# Altium footprint library Batterie_footprint.PcbLib: 67 footprints (part 5 of 5)
Each footprint in its own frame and in the unit in brackets; x right, y up, seen from the top. Pads: shape width x height; smd on the part's side, far side on the other; paste and mask are expansions set on the pad; w line width, h text height; cw(c..) or ccw(c..) is an arc to the next point about the centre after c.
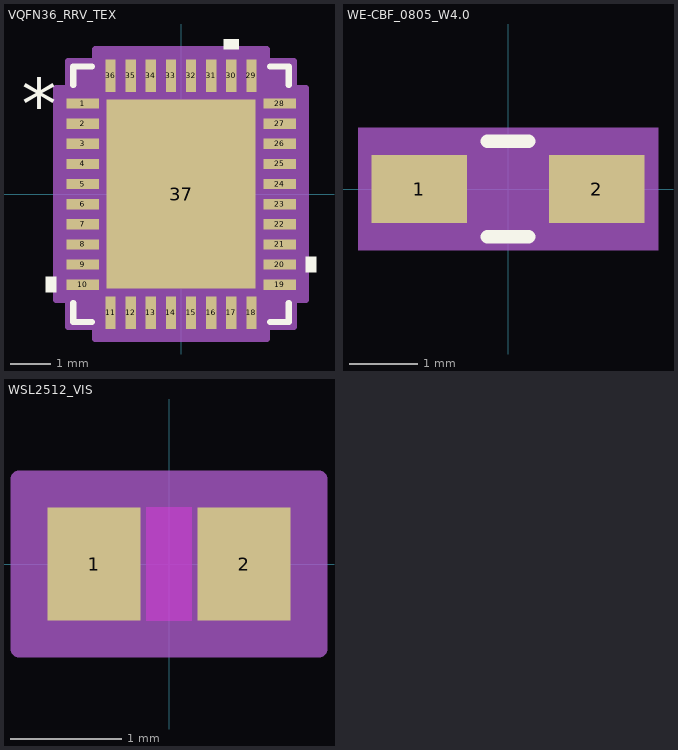
[diagram p4: the footprints below, top view; thin cyan lines are the x and y axes]

## VQFN36_RRV_TEX [mil]
pads (37):
  rect 31.81x10.03 smd paste+0 mask+0: 1(-96.41,88.61) 2(-96.41,68.92) 3(-96.41,49.23) 4(-96.41,29.54) 5(-96.41,9.85) 6(-96.41,-9.85) 7(-96.41,-29.54) 8(-96.41,-49.23) 9(-96.41,-68.92) 10(-96.41,-88.61) 19(96.41,-88.61) 20(96.41,-68.92) 21(96.41,-49.23) 22(96.41,-29.54) 23(96.41,-9.85) 24(96.41,9.85) 25(96.41,29.54) 26(96.41,49.23) 27(96.41,68.92) 28(96.41,88.61)
  rect 10.03x31.81 smd paste+0 mask+0: 11(-68.92,-115.91) 12(-49.23,-115.91) 13(-29.54,-115.91) 14(-9.85,-115.91) 15(9.85,-115.91) 16(29.54,-115.91) 17(49.23,-115.91) 18(68.92,-115.91) 29(68.92,115.91) 30(49.23,115.91) 31(29.54,115.91) 32(9.85,115.91) 33(-9.85,115.91) 34(-29.54,115.91) 35(-49.23,115.91) 36(-68.92,115.91)
  rect 146x185 smd paste+0 mask+0: 37(0,0)
Top Overlay:
  region: -122.31,-81.11 -132.31,-81.11 -132.31,-96.11 -122.31,-96.11
  region: 122.31,-61.41 132.31,-61.41 132.31,-76.42 122.31,-76.42
  region: 56.73,141.81 41.73,141.81 41.73,151.81 56.73,151.81
  lines w6: -105.5,-106.72 -105.5,-125 -87.03,-125 ; -105.5,106.72 -105.5,125 -87.03,125 ; 87.03,-125 105.5,-125 105.5,-106.72 ; 87.03,125 105.5,125 105.5,106.72
  text "*" at -155.81,63.6 h50
  text ".Designator" at -137.5,-25 h50
Mechanical 13:
  lines w1: -100.5,70 -50.5,120 ; -100.5,-120 100.5,-120 100.5,120 -100.5,120 -100.5,-120 ; -100.5,-94.61 -100.5,-82.61 -100.5,-94.61 ; -100.5,-74.92 -100.5,-62.91 -100.5,-74.92 ; -100.5,-55.23 -100.5,-43.23 -100.5,-55.23 ; -100.5,-35.53 -100.5,-23.54 -100.5,-35.53 ; -100.5,-15.85 -100.5,-3.85 -100.5,-15.85 ; -100.5,3.85 -100.5,15.85 -100.5,3.85 ; -100.5,23.54 -100.5,35.53 -100.5,23.54 ; -100.5,43.23 -100.5,55.23 -100.5,43.23 ; -100.5,62.91 -100.5,74.92 -100.5,62.91 ; -100.5,82.61 -100.5,94.61 -100.5,82.61 ; -74.92,-120 -62.91,-120 -74.92,-120 ; -74.92,120 -62.91,120 -74.92,120 ; -55.23,-120 -43.23,-120 -55.23,-120 ; -55.23,120 -43.23,120 -55.23,120 ; -35.53,-120 -23.54,-120 -35.53,-120 ; -35.53,120 -23.54,120 -35.53,120 ; -15.85,-120 -3.85,-120 -15.85,-120 ; -15.85,120 -3.85,120 -15.85,120 ; 3.85,-120 15.85,-120 3.85,-120 ; 3.85,120 15.85,120 3.85,120 ; 23.54,-120 35.53,-120 23.54,-120 ; 23.54,120 35.53,120 23.54,120 ; 43.23,-120 55.23,-120 43.23,-120 ; 43.23,120 55.23,120 43.23,120 ; 62.91,-120 74.92,-120 62.91,-120 ; 62.91,120 74.92,120 62.91,120 ; 100.5,-94.61 100.5,-82.61 100.5,-94.61 ; 100.5,-74.92 100.5,-62.91 100.5,-74.92 ; 100.5,-55.23 100.5,-43.23 100.5,-55.23 ; 100.5,-35.53 100.5,-23.54 100.5,-35.53 ; 100.5,-15.85 100.5,-3.85 100.5,-15.85 ; 100.5,3.85 100.5,15.85 100.5,3.85 ; 100.5,23.54 100.5,35.53 100.5,23.54 ; 100.5,43.23 100.5,55.23 100.5,43.23 ; 100.5,62.91 100.5,74.92 100.5,62.91 ; 100.5,82.61 100.5,94.61 100.5,82.61
  text ".Designator" at -137.5,-25 h50
  text "*" at -62,63.6 h50
Mechanical 15:
  region: -83.93,-130 -110.5,-130 -110.5,-103.62 -122.31,-103.62 -122.31,103.62 -110.5,103.62 -110.5,130 -83.93,130 -83.93,141.81 83.93,141.81 83.93,130 110.5,130 110.5,103.62 122.31,103.62 122.31,-103.62 110.5,-103.62 110.5,-130 83.93,-130 83.93,-141.81 -83.93,-141.81
  lines w6: -122.31,-103.62 -110.5,-103.62 -110.5,-130 -83.93,-130 -83.93,-141.81 83.93,-141.81 83.93,-130 110.5,-130 110.5,-103.62 122.31,-103.62 122.31,103.62 110.5,103.62 110.5,130 83.93,130 83.93,141.81 -83.93,141.81 -83.93,130 -110.5,130 -110.5,103.62 -122.31,103.62 -122.31,-103.62
3D body "VQFN36_RRV_TEX.step": height 39.09, standoff 0, extent -100.51,-120 100.51,120

## WE-CBF_0805_W4.0 [mm]
pads (2):
  rect 1.4x1 smd: 1(-1.3,0) 2(1.3,0)
Top Overlay:
  lines w0.2: -0.3,-0.7 0.3,-0.7 ; -0.3,0.7 0.3,0.7
Mechanical 13:
  lines w0.1: -1,-0.6 -1,0.6 1,0.6 1,-0.6 -1,-0.6
Mechanical 15:
  region: 2.2,-0.9 -2.2,-0.9 -2.2,0.9 2.2,0.9

## WSL2512_VIS [mil]
pads (2):
  rect 33x40 smd paste+0 mask+0: 1(-26.5,0) 2(26.5,0)
Top Layer keep-out:
  region: -8,-18 -8,18 8,18 8,-18
Top Overlay:
  text ".Designator" at -137.5,-25 h50
Keep-Out Layer:
  region: -8,-20 -8,20 8,20 8,-20
Mechanical 13:
  lines w1: -35,-20 -35,20 ; -35,-20 -10,-20 -10,20 -35,20 ; -35,-20 35,-20 ; -35,-20 -35,20 ; -35,20 35,20 ; 35,-20 10,-20 10,20 35,20 ; 35,-20 35,20 ; 35,-20 35,20
  text ".Designator" at -137.5,-25 h50
Mechanical 15:
  region: 53,-30 -53,-30 -53,30 53,30
  lines w6: -53,-30 -53,30 53,30 53,-30 -53,-30
3D body "WSL2512_VIS.step": height 17.99, standoff 0, extent -35,-20 35,20